# Altium footprint library SnapEDApcb.PcbLib: 1 footprints
Each footprint in its own frame and in the unit in brackets; x right, y up, seen from the top. Pads: shape width x height; smd on the part's side, far side on the other; paste and mask are expansions set on the pad; w line width, h text height; cw(c..) or ccw(c..) is an arc to the next point about the centre after c.
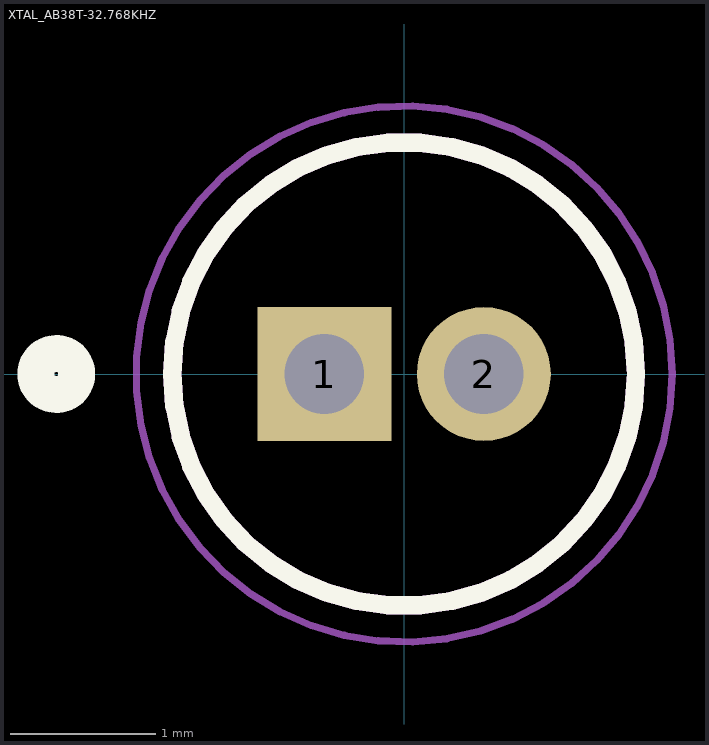
[diagram p0: the footprint, top view; thin cyan lines are the x and y axes]

## XTAL_AB38T-32.768KHZ [mm]
pads (2):
  rect 0.925x0.925 hole 0.55: 1(-0.55,0)
  round 0.925 hole 0.55: 2(0.55,0)
Top Overlay:
  circle w0.254: c-2.4,0 r0.141
  circle w0.127: c0,0 r1.6
Mechanical 13:
  circle w0.127: c0,0 r1.6
Mechanical 15:
  circle w0.05: c0,0 r1.85